# EAGLE library part TQP7M9106 (library TQP7M9106)
RF Amplifier IC CDMA, LTE, W-CDMA 50MHz ~ 1.5GHz 24-QFN (4x4), 4.75V ~ 5.25V Source: Datasheet <https://www.qorvo.com/products/p/TQP7M9106#documents>
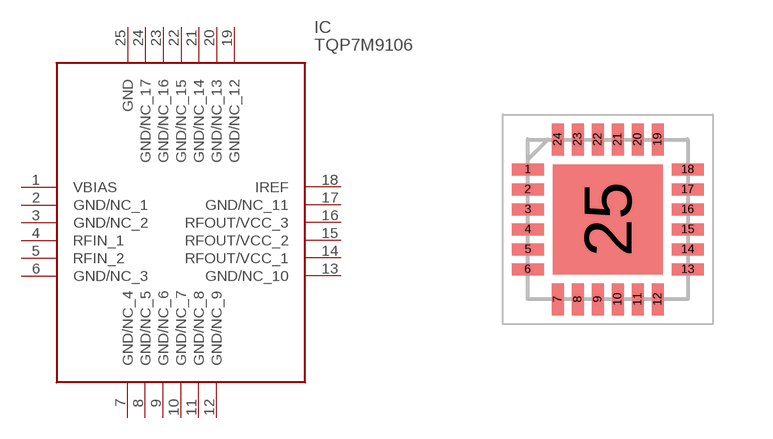
[diagram p0: symbol with the pads of QFN50P400X400X90-25N; footprint QFN50P400X400X90-25N]

Designator prefix IC

## TQP7M9106 (Description: RF Amplifier IC CDMA, LTE, W-CDMA 50MHz ~ 1.5GHz 24-QFN (4x4), 4.75V ~ 5.25V; Height: 0.9mm; Manufacturer_Name: Qorvo; Manufacturer_Part_Number: TQP7M9106; Mouser_Part_Number: 772-TQP7M9106; Mouser_Price-Stock: https://www.mouser.co.uk/ProductDetail/Qorvo/TQP7M9106?qs=ZyJ8JrQCoIZWZMWEw%252BwsMg%3D%3D)  [QFN50P400X400X90-25N]
1  VBIAS
2  GND/NC_1
3  GND/NC_2
4  RFIN_1
5  RFIN_2
6  GND/NC_3
7  GND/NC_4
8  GND/NC_5
9  GND/NC_6
10  GND/NC_7
11  GND/NC_8
12  GND/NC_9
13  GND/NC_10
14  RFOUT/VCC_1
15  RFOUT/VCC_2
16  RFOUT/VCC_3
17  GND/NC_11
18  IREF
19  GND/NC_12
20  GND/NC_13
21  GND/NC_14
22  GND/NC_15
23  GND/NC_16
24  GND/NC_17
25  GND

## Footprint QFN50P400X400X90-25N (pad centres in mm)
24 Pin 4x4 mm QFN_2026
smd 0.8 x 0.3: 1 -2,1.25; 2 -2,0.75; 3 -2,0.25; 4 -2,-0.25; 5 -2,-0.75; 6 -2,-1.25; 13 2,-1.25; 14 2,-0.75; 15 2,-0.25; 16 2,0.25; 17 2,0.75; 18 2,1.25
smd 0.3 x 0.8: 7 -1.25,-2; 8 -0.75,-2; 9 -0.25,-2; 10 0.25,-2; 11 0.75,-2; 12 1.25,-2; 19 1.25,2; 20 0.75,2; 21 0.25,2; 22 -0.25,2; 23 -0.75,2; 24 -1.25,2
smd 2.75 x 2.75: 25 0,0